# Altium footprint library Package_DFN_QFN.PcbLib: 735 footprints (part 6 of 46)
Each footprint in its own frame and in the unit in brackets; x right, y up, seen from the top. Pads: shape width x height; smd on the part's side, far side on the other; paste and mask are expansions set on the pad; w line width, h text height; cw(c..) or ccw(c..) is an arc to the next point about the centre after c.
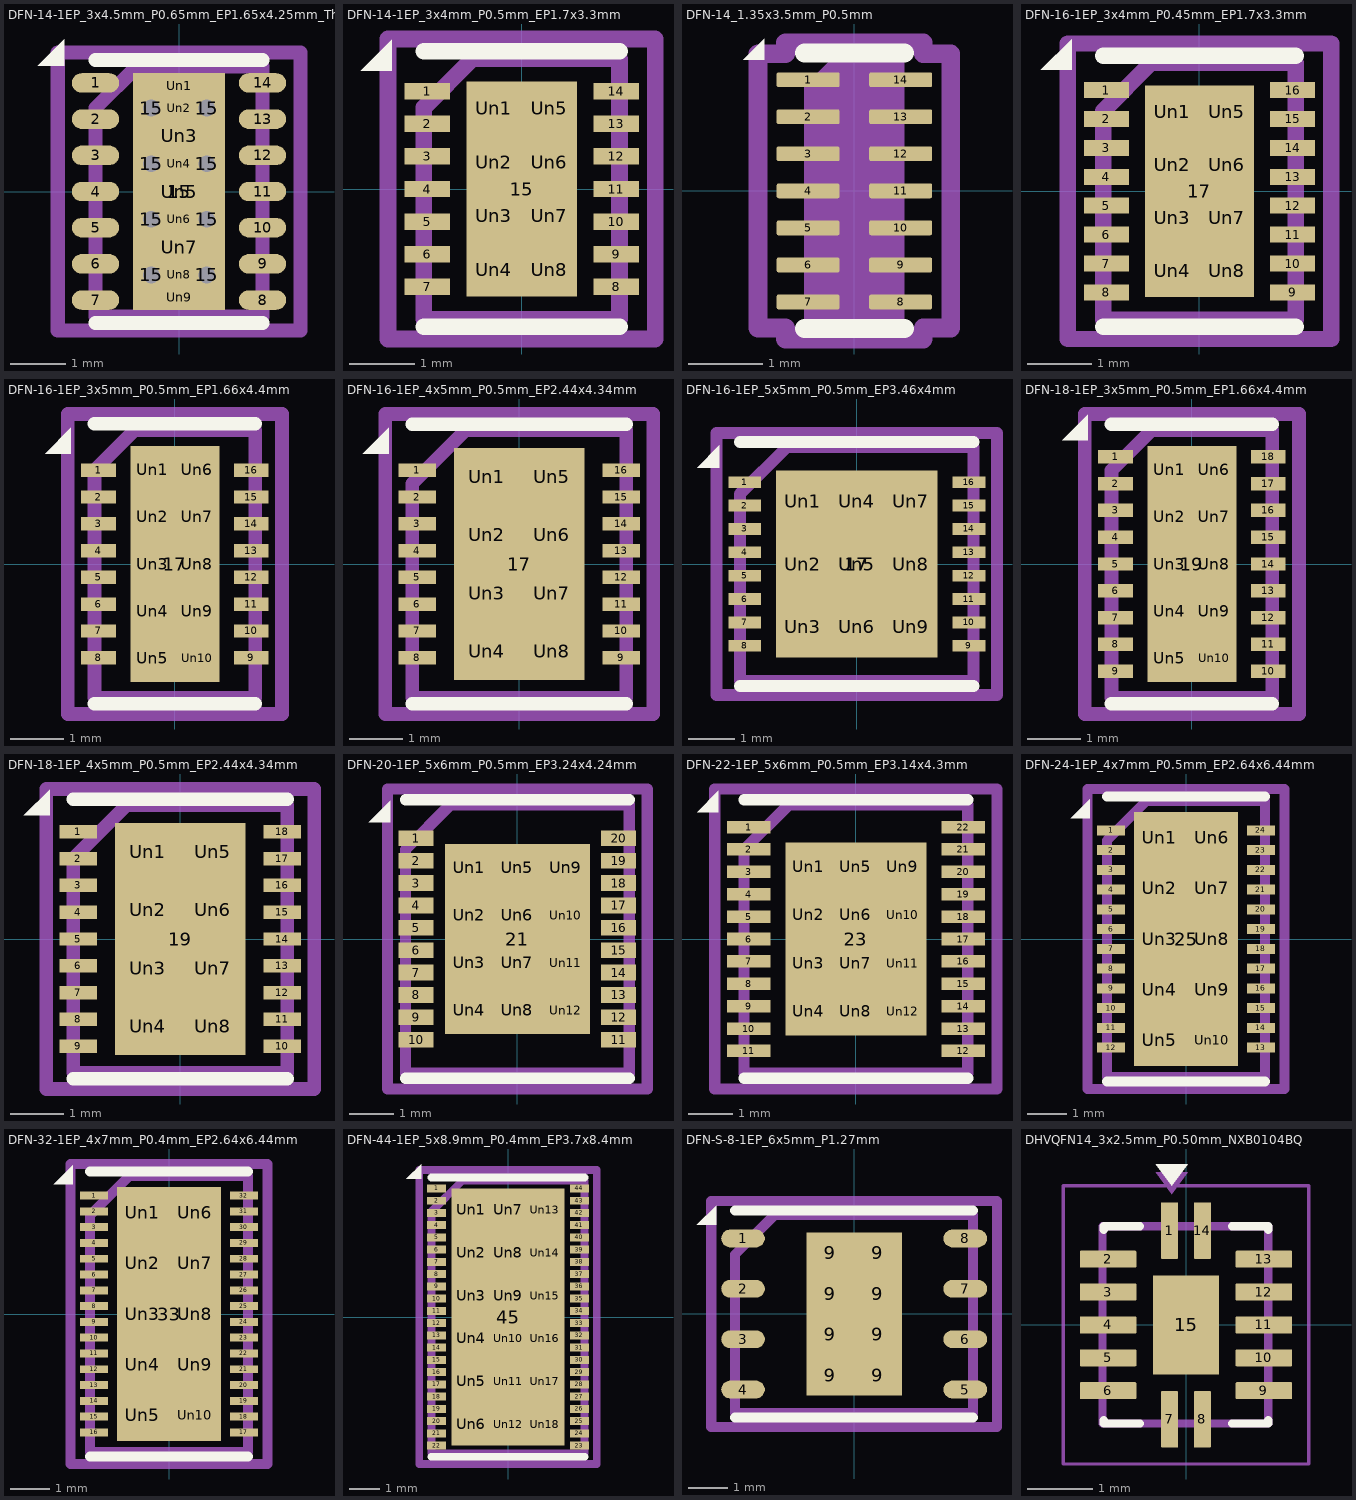
[diagram p5: the footprints below, top view; thin cyan lines are the x and y axes]

## DFN-14-1EP_3x4.5mm_P0.65mm_EP1.65x4.25mm_ThermalVias [mm] "DFN-14-1EP_3x4.5mm_P0.65mm_EP1.65x4.25mm_ThermalVias"
pads (33):
  rrect100% 0.85x0.35 smd: 1(-1.5,1.95) 2(-1.5,1.3) 3(-1.5,0.65) 4(-1.5,0) 5(-1.5,-0.65) 6(-1.5,-1.3) 7(-1.5,-1.95) 8(1.5,-1.95) 9(1.5,-1.3) 10(1.5,-0.65) 11(1.5,0) 12(1.5,0.65) 13(1.5,1.3) 14(1.5,1.95)
  round 0.65 hole 0.3: 15(-0.5,-1.5) 15(-0.5,-0.5) 15(-0.5,0.5) 15(-0.5,1.5) 15(0.5,-1.5) 15(0.5,-0.5) 15(0.5,0.5) 15(0.5,1.5)
  rect 1.65x4.25 smd: 15(0,0)
  rect 1.65x4.25 smd far side: 15(0,0)
  rect 1.5x0.3 on Top Paste: Un1(0,1.9) Un9(0,-1.9)
  rect 0.5x0.5 on Top Paste: Un2(0,1.5) Un4(0,0.5) Un6(0,-0.5) Un8(0,-1.5)
  rect 1.5x0.5 on Top Paste: Un3(0,1) Un5(0,0) Un7(0,-1)
F.SilkS:
  region: -2.06,2.26 -2.54,2.26 -2.06,2.74
  lines w0.254: -1.5,-2.36 1.5,-2.36 ; -1.5,2.36 1.5,2.36
Top Component Center:
  lines w0.127: -0.127,0 0.127,0 -0.127,0 ; 0,-0.127 0,0.127 0,-0.127
Top Assembly:
  lines w0.254: -1.5,-2.25 1.5,-2.25 1.5,2.25 -0.75,2.25 -1.5,1.5 -1.5,-2.25
Top Courtyard:
  lines w0.254: -2.18,-2.5 2.18,-2.5 2.18,2.5 -2.18,2.5 -2.18,-2.5
Top Designator:
  text ".Designator" at -3.43,-0.344 h1.52

## DFN-14-1EP_3x4mm_P0.5mm_EP1.7x3.3mm [mm] "DFN-14-1EP_3x4mm_P0.5mm_EP1.7x3.3mm"
pads (23):
  rect 0.7x0.25 smd: 1(-1.45,1.5) 2(-1.45,1) 3(-1.45,0.5) 4(-1.45,0) 5(-1.45,-0.5) 6(-1.45,-1) 7(-1.45,-1.5) 8(1.45,-1.5) 9(1.45,-1) 10(1.45,-0.5) 11(1.45,0) 12(1.45,0.5) 13(1.45,1) 14(1.45,1.5)
  rect 1.7x3.3 smd: 15(0,0)
  rect 0.685x0.67 on Top Paste: Un1(-0.425,1.238) Un2(-0.425,0.413) Un3(-0.425,-0.413) Un4(-0.425,-1.238) Un5(0.425,1.238) Un6(0.425,0.413) Un7(0.425,-0.413) Un8(0.425,-1.238)
F.SilkS:
  region: -1.99,1.81 -2.47,1.81 -1.99,2.29
  lines w0.254: -1.5,-2.11 1.5,-2.11 ; -1.5,2.11 1.5,2.11
Top Component Center:
  lines w0.127: -0.127,0 0.127,0 -0.127,0 ; 0,-0.127 0,0.127 0,-0.127
Top Assembly:
  lines w0.254: -1.5,-2 1.5,-2 1.5,2 -0.75,2 -1.5,1.25 -1.5,-2
Top Courtyard:
  lines w0.254: -2.05,-2.3 2.05,-2.3 2.05,2.3 -2.05,2.3 -2.05,-2.3
Top Designator:
  text ".Designator" at -3.43,-0.344 h1.52
3D body "DFN-14-1EP_3x4mm_P0.5mm_EP1.7x3.3mm.step": height 0.77, standoff 0, extent -1.5,-1.99 1.5,1.99

## DFN-14_1.35x3.5mm_P0.5mm [mm] "DFN-14_1.35x3.5mm_P0.5mm"
pads (14):
  rrect25% 0.85x0.2 smd: 1(-0.625,1.5) 2(-0.625,1) 3(-0.625,0.5) 4(-0.625,0) 5(-0.625,-0.5) 6(-0.625,-1) 7(-0.625,-1.5) 8(0.625,-1.5) 9(0.625,-1) 10(0.625,-0.5) 11(0.625,0) 12(0.625,0.5) 13(0.625,1) 14(0.625,1.5)
F.SilkS:
  region: -1.22,1.77 -1.5,1.77 -1.22,2.05
  lines w0.254: -0.675,-1.86 0.675,-1.86 ; -0.675,1.86 0.675,1.86
Top Component Center:
  lines w0.127: -0.127,0 0.127,0 -0.127,0 ; 0,-0.127 0,0.127 0,-0.127
Top Assembly:
  region: 0.675,-1.75 -0.675,-1.75 -0.675,1.412 -0.337,1.75 0.675,1.75
Top Courtyard:
  lines w0.254: -1.3,-1.85 -1.3,1.85 -0.93,1.85 -0.93,2 0.93,2 0.93,1.85 1.3,1.85 1.3,-1.85 0.93,-1.85 0.93,-2 -0.93,-2 -0.93,-1.85 -1.3,-1.85
Top Designator:
  text ".Designator" at -2.251,-0.226 h1

## DFN-16-1EP_3x4mm_P0.45mm_EP1.7x3.3mm [mm] "DFN-16-1EP_3x4mm_P0.45mm_EP1.7x3.3mm"
pads (25):
  rect 0.7x0.25 smd: 1(-1.45,1.575) 2(-1.45,1.125) 3(-1.45,0.675) 4(-1.45,0.225) 5(-1.45,-0.225) 6(-1.45,-0.675) 7(-1.45,-1.125) 8(-1.45,-1.575) 9(1.45,-1.575) 10(1.45,-1.125) 11(1.45,-0.675) 12(1.45,-0.225) 13(1.45,0.225) 14(1.45,0.675) 15(1.45,1.125) 16(1.45,1.575)
  rect 1.7x3.3 smd: 17(0,0)
  rect 0.685x0.67 on Top Paste: Un1(-0.425,1.238) Un2(-0.425,0.413) Un3(-0.425,-0.413) Un4(-0.425,-1.238) Un5(0.425,1.238) Un6(0.425,0.413) Un7(0.425,-0.413) Un8(0.425,-1.238)
F.SilkS:
  region: -1.99,1.89 -2.47,1.89 -1.99,2.37
  lines w0.254: -1.5,-2.11 1.5,-2.11 ; -1.5,2.11 1.5,2.11
Top Component Center:
  lines w0.127: -0.127,0 0.127,0 -0.127,0 ; 0,-0.127 0,0.127 0,-0.127
Top Assembly:
  lines w0.254: -1.5,-2 1.5,-2 1.5,2 -0.75,2 -1.5,1.25 -1.5,-2
Top Courtyard:
  lines w0.254: -2.05,-2.3 2.05,-2.3 2.05,2.3 -2.05,2.3 -2.05,-2.3
Top Designator:
  text ".Designator" at -3.43,-0.344 h1.52
3D body "DFN-16-1EP_3x4mm_P0.45mm_EP1.7x3.3mm.step": height 0.77, standoff 0, extent -1.5,-1.99 1.5,1.99

## DFN-16-1EP_3x5mm_P0.5mm_EP1.66x4.4mm [mm] "DFN-16-1EP_3x5mm_P0.5mm_EP1.66x4.4mm"
pads (27):
  rect 0.65x0.25 smd: 1(-1.425,1.75) 2(-1.425,1.25) 3(-1.425,0.75) 4(-1.425,0.25) 5(-1.425,-0.25) 6(-1.425,-0.75) 7(-1.425,-1.25) 8(-1.425,-1.75) 9(1.425,-1.75) 10(1.425,-1.25) 11(1.425,-0.75) 12(1.425,-0.25) 13(1.425,0.25) 14(1.425,0.75) 15(1.425,1.25) 16(1.425,1.75)
  rect 1.66x4.4 smd: 17(0,0)
  rect 0.67x0.71 on Top Paste: Un1(-0.415,1.76) Un2(-0.415,0.88) Un3(-0.415,0) Un4(-0.415,-0.88) Un5(-0.415,-1.76) Un6(0.415,1.76) Un7(0.415,0.88) Un8(0.415,0) Un9(0.415,-0.88) Un10(0.415,-1.76)
F.SilkS:
  region: -1.94,2.06 -2.42,2.06 -1.94,2.54
  lines w0.254: -1.5,-2.61 1.5,-2.61 ; -1.5,2.62 1.5,2.62
Top Component Center:
  lines w0.127: -0.127,0 0.127,0 -0.127,0 ; 0,-0.127 0,0.127 0,-0.127
Top Assembly:
  lines w0.254: -1.5,-2.5 1.5,-2.5 1.5,2.5 -0.75,2.5 -1.5,1.75 -1.5,-2.5
Top Courtyard:
  lines w0.254: -2,-2.8 2,-2.8 2,2.8 -2,2.8 -2,-2.8
Top Designator:
  text ".Designator" at -3.43,-0.344 h1.52
3D body "DFN-16-1EP_3x5mm_P0.5mm_EP1.66x4.4mm.step": height 0.77, standoff 0, extent -1.5,-2.49 1.5,2.49

## DFN-16-1EP_4x5mm_P0.5mm_EP2.44x4.34mm [mm] "DFN-16-1EP_4x5mm_P0.5mm_EP2.44x4.34mm"
pads (25):
  rect 0.7x0.25 smd: 1(-1.9,1.75) 2(-1.9,1.25) 3(-1.9,0.75) 4(-1.9,0.25) 5(-1.9,-0.25) 6(-1.9,-0.75) 7(-1.9,-1.25) 8(-1.9,-1.75) 9(1.9,-1.75) 10(1.9,-1.25) 11(1.9,-0.75) 12(1.9,-0.25) 13(1.9,0.25) 14(1.9,0.75) 15(1.9,1.25) 16(1.9,1.75)
  rect 2.44x4.34 smd: 17(0,0)
  rect 1x0.86 on Top Paste: Un1(-0.61,1.627) Un2(-0.61,0.543) Un3(-0.61,-0.543) Un4(-0.61,-1.627) Un5(0.61,1.627) Un6(0.61,0.543) Un7(0.61,-0.543) Un8(0.61,-1.627)
F.SilkS:
  region: -2.44,2.06 -2.92,2.06 -2.44,2.54
  lines w0.254: -2,-2.61 2,-2.61 ; -2,2.61 2,2.61
Top Component Center:
  lines w0.127: -0.127,0 0.127,0 -0.127,0 ; 0,-0.127 0,0.127 0,-0.127
Top Assembly:
  lines w0.254: -2,-2.5 -2,1.5 -1,2.5 2,2.5 2,-2.5 -2,-2.5
Top Courtyard:
  lines w0.254: -2.5,-2.8 -2.5,2.8 2.5,2.8 2.5,-2.8 -2.5,-2.8
Top Designator:
  text ".Designator" at -3.43,-0.344 h1.52

## DFN-16-1EP_5x5mm_P0.5mm_EP3.46x4mm [mm] "DFN-16-1EP_5x5mm_P0.5mm_EP3.46x4mm"
pads (26):
  rect 0.7x0.25 smd: 1(-2.4,1.75) 2(-2.4,1.25) 3(-2.4,0.75) 4(-2.4,0.25) 5(-2.4,-0.25) 6(-2.4,-0.75) 7(-2.4,-1.25) 8(-2.4,-1.75) 9(2.4,-1.75) 10(2.4,-1.25) 11(2.4,-0.75) 12(2.4,-0.25) 13(2.4,0.25) 14(2.4,0.75) 15(2.4,1.25) 16(2.4,1.75)
  rect 3.46x4 smd: 17(0,0)
  rect 0.9x1.1 on Top Paste: Un1(-1.154,1.34) Un2(-1.154,0) Un3(-1.154,-1.34) Un4(0,1.34) Un5(0,0) Un6(0,-1.34) Un7(1.154,1.34) Un8(1.154,0) Un9(1.154,-1.34)
F.SilkS:
  region: -2.94,2.06 -3.42,2.06 -2.94,2.54
  lines w0.254: -2.5,-2.61 2.5,-2.61 ; -2.5,2.61 2.5,2.61
Top Component Center:
  lines w0.127: -0.127,0 0.127,0 -0.127,0 ; 0,-0.127 0,0.127 0,-0.127
Top Assembly:
  lines w0.254: -2.5,-2.5 -2.5,1.5 -1.5,2.5 2.5,2.5 2.5,-2.5 -2.5,-2.5
Top Courtyard:
  lines w0.254: -3,-2.8 -3,2.8 3,2.8 3,-2.8 -3,-2.8
Top Designator:
  text ".Designator" at -3.43,-0.344 h1.52
3D body "DFN-16-1EP_5x5mm_P0.5mm_EP3.46x4mm.step": height 0.77, standoff 0, extent -2.5,-2.49 2.5,2.49

## DFN-18-1EP_3x5mm_P0.5mm_EP1.66x4.4mm [mm] "DFN-18-1EP_3x5mm_P0.5mm_EP1.66x4.4mm"
pads (29):
  rect 0.65x0.25 smd: 1(-1.425,2) 2(-1.425,1.5) 3(-1.425,1) 4(-1.425,0.5) 5(-1.425,0) 6(-1.425,-0.5) 7(-1.425,-1) 8(-1.425,-1.5) 9(-1.425,-2) 10(1.425,-2) 11(1.425,-1.5) 12(1.425,-1) 13(1.425,-0.5) 14(1.425,0) 15(1.425,0.5) 16(1.425,1) 17(1.425,1.5) 18(1.425,2)
  rect 1.66x4.4 smd: 19(0,0)
  rect 0.67x0.71 on Top Paste: Un1(-0.415,1.76) Un2(-0.415,0.88) Un3(-0.415,0) Un4(-0.415,-0.88) Un5(-0.415,-1.76) Un6(0.415,1.76) Un7(0.415,0.88) Un8(0.415,0) Un9(0.415,-0.88) Un10(0.415,-1.76)
F.SilkS:
  region: -1.94,2.31 -2.42,2.31 -1.94,2.79
  lines w0.254: -1.5,-2.61 1.5,-2.61 ; -1.5,2.61 1.5,2.61
Top Component Center:
  lines w0.127: -0.127,0 0.127,0 -0.127,0 ; 0,-0.127 0,0.127 0,-0.127
Top Assembly:
  lines w0.254: -1.5,-2.5 1.5,-2.5 1.5,2.5 -0.75,2.5 -1.5,1.75 -1.5,-2.5
Top Courtyard:
  lines w0.254: -2,-2.8 2,-2.8 2,2.8 -2,2.8 -2,-2.8
Top Designator:
  text ".Designator" at -3.43,-0.344 h1.52
3D body "DFN-18-1EP_3x5mm_P0.5mm_EP1.66x4.4mm.step": height 0.77, standoff 0, extent -1.5,-2.49 1.5,2.49

## DFN-18-1EP_4x5mm_P0.5mm_EP2.44x4.34mm [mm] "DFN-18-1EP_4x5mm_P0.5mm_EP2.44x4.34mm"
pads (27):
  rect 0.7x0.25 smd: 1(-1.9,2) 2(-1.9,1.5) 3(-1.9,1) 4(-1.9,0.5) 5(-1.9,0) 6(-1.9,-0.5) 7(-1.9,-1) 8(-1.9,-1.5) 9(-1.9,-2) 10(1.9,-2) 11(1.9,-1.5) 12(1.9,-1) 13(1.9,-0.5) 14(1.9,0) 15(1.9,0.5) 16(1.9,1) 17(1.9,1.5) 18(1.9,2)
  rect 2.44x4.34 smd: 19(0,0)
  rect 1x0.86 on Top Paste: Un1(-0.61,1.627) Un2(-0.61,0.543) Un3(-0.61,-0.543) Un4(-0.61,-1.627) Un5(0.61,1.627) Un6(0.61,0.543) Un7(0.61,-0.543) Un8(0.61,-1.627)
F.SilkS:
  region: -2.44,2.31 -2.92,2.31 -2.44,2.79
  lines w0.254: -2,-2.61 2,-2.61 ; -2,2.61 2,2.61
Top Component Center:
  lines w0.127: -0.127,0 0.127,0 -0.127,0 ; 0,-0.127 0,0.127 0,-0.127
Top Assembly:
  lines w0.254: -2,-2.5 2,-2.5 2,2.5 -1,2.5 -2,1.5 -2,-2.5
Top Courtyard:
  lines w0.254: -2.5,-2.8 2.5,-2.8 2.5,2.8 -2.5,2.8 -2.5,-2.8
Top Designator:
  text ".Designator" at -3.43,-0.344 h1.52
3D body "DFN-18-1EP_4x5mm_P0.5mm_EP2.44x4.34mm.step": height 0.77, standoff 0, extent -2,-2.49 2,2.49

## DFN-20-1EP_5x6mm_P0.5mm_EP3.24x4.24mm [mm] "DFN-20-1EP_5x6mm_P0.5mm_EP3.24x4.24mm"
pads (33):
  rect 0.78x0.35 smd: 1(-2.26,2.25) 2(-2.26,1.75) 3(-2.26,1.25) 4(-2.26,0.75) 5(-2.26,0.25) 6(-2.26,-0.25) 7(-2.26,-0.75) 8(-2.26,-1.25) 9(-2.26,-1.75) 10(-2.26,-2.25) 11(2.26,-2.25) 12(2.26,-1.75) 13(2.26,-1.25) 14(2.26,-0.75) 15(2.26,-0.25) 16(2.26,0.25) 17(2.26,0.75) 18(2.26,1.25) 19(2.26,1.75) 20(2.26,2.25)
  rect 3.24x4.24 smd: 21(0,0)
  rect 0.86x0.86 on Top Paste: Un1(-1.08,1.59) Un2(-1.08,0.53) Un3(-1.08,-0.53) Un4(-1.08,-1.59) Un5(0,1.59) Un6(0,0.53) Un7(0,-0.53) Un8(0,-1.59) Un9(1.08,1.59) Un10(1.08,0.53) Un11(1.08,-0.53) Un12(1.08,-1.59)
F.SilkS:
  region: -2.84,2.61 -3.32,2.61 -2.84,3.09
  lines w0.254: -2.5,-3.11 2.5,-3.11 ; -2.5,3.11 2.5,3.11
Top Component Center:
  lines w0.127: -0.127,0 0.127,0 -0.127,0 ; 0,-0.127 0,0.127 0,-0.127
Top Assembly:
  lines w0.254: -2.5,-3 2.5,-3 2.5,3 -1.5,3 -2.5,2 -2.5,-3
Top Courtyard:
  lines w0.254: -2.9,-3.35 2.9,-3.35 2.9,3.35 -2.9,3.35 -2.9,-3.35
Top Designator:
  text ".Designator" at -3.43,-0.344 h1.52
3D body "DFN-20-1EP_5x6mm_P0.5mm_EP3.24x4.24mm.step": height 0.92, standoff 0, extent -2.5,-2.99 2.5,2.99

## DFN-22-1EP_5x6mm_P0.5mm_EP3.14x4.3mm [mm] "DFN-22-1EP_5x6mm_P0.5mm_EP3.14x4.3mm"
pads (35):
  rect 0.98x0.28 smd: 1(-2.395,2.5) 2(-2.395,2) 3(-2.395,1.5) 4(-2.395,1) 5(-2.395,0.5) 6(-2.395,0) 7(-2.395,-0.5) 8(-2.395,-1) 9(-2.395,-1.5) 10(-2.395,-2) 11(-2.395,-2.5) 12(2.395,-2.5) 13(2.395,-2) 14(2.395,-1.5) 15(2.395,-1) 16(2.395,-0.5) 17(2.395,0) 18(2.395,0.5) 19(2.395,1) 20(2.395,1.5) 21(2.395,2) 22(2.395,2.5)
  rect 3.14x4.3 smd: 23(0,0)
  rect 0.855x0.855 on Top Paste: Un1(-1.05,1.613) Un2(-1.05,0.537) Un3(-1.05,-0.537) Un4(-1.05,-1.613) Un5(0,1.613) Un6(0,0.537) Un7(0,-0.537) Un8(0,-1.613) Un9(1.05,1.613) Un10(1.05,0.537) Un11(1.05,-0.537) Un12(1.05,-1.613)
F.SilkS:
  region: -3.07,2.83 -3.55,2.83 -3.07,3.31
  lines w0.254: -2.5,-3.11 2.5,-3.11 ; -2.5,3.11 2.5,3.11
Top Component Center:
  lines w0.127: -0.127,0 0.127,0 -0.127,0 ; 0,-0.127 0,0.127 0,-0.127
Top Assembly:
  lines w0.254: -2.5,-3 2.5,-3 2.5,3 -1.5,3 -2.5,2 -2.5,-3
Top Courtyard:
  lines w0.254: -3.15,-3.35 3.15,-3.35 3.15,3.35 -3.15,3.35 -3.15,-3.35
Top Designator:
  text ".Designator" at -3.43,-0.344 h1.52
3D body "DFN-22-1EP_5x6mm_P0.5mm_EP3.14x4.3mm.step": height 0.92, standoff 0, extent -2.5,-2.99 2.5,2.99

## DFN-24-1EP_4x7mm_P0.5mm_EP2.64x6.44mm [mm] "DFN-24-1EP_4x7mm_P0.5mm_EP2.64x6.44mm"
pads (35):
  rect 0.7x0.25 smd: 1(-1.9,2.75) 2(-1.9,2.25) 3(-1.9,1.75) 4(-1.9,1.25) 5(-1.9,0.75) 6(-1.9,0.25) 7(-1.9,-0.25) 8(-1.9,-0.75) 9(-1.9,-1.25) 10(-1.9,-1.75) 11(-1.9,-2.25) 12(-1.9,-2.75) 13(1.9,-2.75) 14(1.9,-2.25) 15(1.9,-1.75) 16(1.9,-1.25) 17(1.9,-0.75) 18(1.9,-0.25) 19(1.9,0.25) 20(1.9,0.75) 21(1.9,1.25) 22(1.9,1.75) 23(1.9,2.25) 24(1.9,2.75)
  rect 2.64x6.44 smd: 25(0,0)
  rect 1.05x1.05 on Top Paste: Un1(-0.66,2.56) Un2(-0.66,1.28) Un3(-0.66,0) Un4(-0.66,-1.28) Un5(-0.66,-2.56) Un6(0.66,2.56) Un7(0.66,1.28) Un8(0.66,0) Un9(0.66,-1.28) Un10(0.66,-2.56)
F.SilkS:
  region: -2.44,3.06 -2.92,3.06 -2.44,3.54
  lines w0.254: -2,-3.61 2,-3.61 ; -2,3.61 2,3.61
Top Component Center:
  lines w0.127: -0.127,0 0.127,0 -0.127,0 ; 0,-0.127 0,0.127 0,-0.127
Top Assembly:
  lines w0.254: -2,-3.5 -2,2.5 -1,3.5 2,3.5 2,-3.5 -2,-3.5
Top Courtyard:
  lines w0.254: -2.5,-3.8 -2.5,3.8 2.5,3.8 2.5,-3.8 -2.5,-3.8
Top Designator:
  text ".Designator" at -3.43,-0.344 h1.52
3D body "DFN-24-1EP_4x7mm_P0.5mm_EP2.64x6.44mm.step": height 0.77, standoff 0, extent -2,-3.49 2,3.49

## DFN-32-1EP_4x7mm_P0.4mm_EP2.64x6.44mm [mm] "DFN-32-1EP_4x7mm_P0.4mm_EP2.64x6.44mm"
pads (43):
  rect 0.7x0.2 smd: 1(-1.9,3) 2(-1.9,2.6) 3(-1.9,2.2) 4(-1.9,1.8) 5(-1.9,1.4) 6(-1.9,1) 7(-1.9,0.6) 8(-1.9,0.2) 9(-1.9,-0.2) 10(-1.9,-0.6) 11(-1.9,-1) 12(-1.9,-1.4) 13(-1.9,-1.8) 14(-1.9,-2.2) 15(-1.9,-2.6) 16(-1.9,-3) 17(1.9,-3) 18(1.9,-2.6) 19(1.9,-2.2) 20(1.9,-1.8) 21(1.9,-1.4) 22(1.9,-1) 23(1.9,-0.6) 24(1.9,-0.2) 25(1.9,0.2) 26(1.9,0.6) 27(1.9,1) 28(1.9,1.4) 29(1.9,1.8) 30(1.9,2.2) 31(1.9,2.6) 32(1.9,3)
  rect 2.64x6.44 smd: 33(0,0)
  rect 1.05x1.05 on Top Paste: Un1(-0.66,2.56) Un2(-0.66,1.28) Un3(-0.66,0) Un4(-0.66,-1.28) Un5(-0.66,-2.56) Un6(0.66,2.56) Un7(0.66,1.28) Un8(0.66,0) Un9(0.66,-1.28) Un10(0.66,-2.56)
F.SilkS:
  region: -2.44,3.29 -2.92,3.29 -2.44,3.77
  lines w0.254: -2,-3.61 2,-3.61 ; -2,3.61 2,3.61
Top Component Center:
  lines w0.127: -0.127,0 0.127,0 -0.127,0 ; 0,-0.127 0,0.127 0,-0.127
Top Assembly:
  lines w0.254: -2,-3.5 2,-3.5 2,3.5 -1,3.5 -2,2.5 -2,-3.5
Top Courtyard:
  lines w0.254: -2.5,-3.8 2.5,-3.8 2.5,3.8 -2.5,3.8 -2.5,-3.8
Top Designator:
  text ".Designator" at -3.43,-0.344 h1.52
3D body "DFN-32-1EP_4x7mm_P0.4mm_EP2.64x6.44mm.step": height 0.77, standoff 0, extent -2,-3.49 2,3.49

## DFN-44-1EP_5x8.9mm_P0.4mm_EP3.7x8.4mm [mm] "DFN-44-1EP_5x8.9mm_P0.4mm_EP3.7x8.4mm"
pads (63):
  rect 0.63x0.26 smd: 1(-2.335,4.2) 2(-2.335,3.8) 3(-2.335,3.4) 4(-2.335,3) 5(-2.335,2.6) 6(-2.335,2.2) 7(-2.335,1.8) 8(-2.335,1.4) 9(-2.335,1) 10(-2.335,0.6) 11(-2.335,0.2) 12(-2.335,-0.2) 13(-2.335,-0.6) 14(-2.335,-1) 15(-2.335,-1.4) 16(-2.335,-1.8) 17(-2.335,-2.2) 18(-2.335,-2.6) 19(-2.335,-3) 20(-2.335,-3.4) 21(-2.335,-3.8) 22(-2.335,-4.2) 23(2.335,-4.2) 24(2.335,-3.8) 25(2.335,-3.4) 26(2.335,-3) 27(2.335,-2.6) 28(2.335,-2.2) 29(2.335,-1.8) 30(2.335,-1.4) 31(2.335,-1) 32(2.335,-0.6) 33(2.335,-0.2) 34(2.335,0.2) 35(2.335,0.6) 36(2.335,1) 37(2.335,1.4) 38(2.335,1.8) 39(2.335,2.2) 40(2.335,2.6) 41(2.335,3) 42(2.335,3.4) 43(2.335,3.8) 44(2.335,4.2)
  rect 3.7x8.4 smd: 45(0,0)
  rect 0.98x1.15 on Top Paste: Un1(-1.2,3.5) Un2(-1.2,2.1) Un3(-1.2,0.7) Un4(-1.2,-0.7) Un5(-1.2,-2.1) Un6(-1.2,-3.5) Un7(0,3.5) Un8(0,2.1) Un9(0,0.7) Un10(0,-0.7) Un11(0,-2.1) Un12(0,-3.5) Un13(1.2,3.5) Un14(1.2,2.1) Un15(1.2,0.7) Un16(1.2,-0.7) Un17(1.2,-2.1) Un18(1.2,-3.5)
F.SilkS:
  region: -2.84,4.52 -3.32,4.52 -2.84,5
  lines w0.254: -2.5,-4.56 2.5,-4.56 ; -2.5,4.56 2.5,4.56
Top Component Center:
  lines w0.127: -0.127,0 0.127,0 -0.127,0 ; 0,-0.127 0,0.127 0,-0.127
Top Assembly:
  lines w0.254: -2.5,-4.45 2.5,-4.45 2.5,4.45 -1.5,4.45 -2.5,3.45 -2.5,-4.45
Top Courtyard:
  lines w0.254: -2.9,-4.8 2.9,-4.8 2.9,4.8 -2.9,4.8 -2.9,-4.8
Top Designator:
  text ".Designator" at -3.43,-0.344 h1.52
3D body "DFN-44-1EP_5x8.9mm_P0.4mm_EP3.7x8.4mm.step": height 0.87, standoff 0, extent -2.5,-4.44 2.5,4.44

## DFN-S-8-1EP_6x5mm_P1.27mm [mm] "DFN-S-8-1EP_6x5mm_P1.27mm"
pads (16):
  rrect100% 1.1x0.45 smd: 1(-2.8,1.905) 2(-2.8,0.635) 3(-2.8,-0.635) 4(-2.8,-1.905) 5(2.8,-1.905) 6(2.8,-0.635) 7(2.8,0.635) 8(2.8,1.905)
  rect 1.2x1.025 smd: 9(-0.6,-1.538) 9(-0.6,-0.512) 9(-0.6,0.513) 9(-0.6,1.538) 9(0.6,-1.538) 9(0.6,-0.512) 9(0.6,0.513) 9(0.6,1.538)
F.SilkS:
  region: -3.48,2.25 -3.96,2.25 -3.48,2.73
  lines w0.254: -3,-2.61 3,-2.61 ; -3,2.61 3,2.61
Top Component Center:
  lines w0.127: -0.127,0 0.127,0 -0.127,0 ; 0,-0.127 0,0.127 0,-0.127
Top Assembly:
  lines w0.254: -3,-2.5 -3,1.5 -2,2.5 3,2.5 3,-2.5 -3,-2.5
Top Courtyard:
  lines w0.254: -3.6,-2.85 -3.6,2.85 3.6,2.85 3.6,-2.85 -3.6,-2.85
Top Designator:
  text ".Designator" at -3.43,-0.344 h1.52
3D body "DFN-S-8-1EP_6x5mm_P1.27mm.step": height 0.92, standoff 0, extent -3,-2.49 3,2.49

## DHVQFN14_3x2.5mm_P0.50mm_NXB0104BQ [mm]
pads (15):
  rrect12% 0.26x0.86 smd: 1(-0.25,1.435) 7(-0.25,-1.435) 8(0.25,-1.435) 14(0.25,1.435)
  rrect12% 0.86x0.26 smd: 2(-1.185,1) 3(-1.185,0.5) 4(-1.185,0) 5(-1.185,-0.5) 6(-1.185,-1) 9(1.185,-1) 10(1.185,-0.5) 11(1.185,0) 12(1.185,0.5) 13(1.185,1)
  rect 1x1.5 smd: 15(0,0)
F.SilkS:
  region: -0.217,2.118 -0.457,2.448 0.023,2.448
  lines w0.127: -1.25,-1.45 -1.25,-1.5 -0.7,-1.5 ; -1.25,1.45 -1.25,1.5 -0.7,1.5 ; 0.7,-1.5 1.25,-1.5 1.25,-1.45 ; 0.7,1.5 1.25,1.5 1.25,1.45
F.Paste:
  region: 0.32,-0.47 -0.32,-0.47 -0.32,0.47 0.32,0.47
Top Assembly:
  region: -0.217,1.991 -0.457,2.321 0.023,2.321
  lines w0.127: -1.27,-1.5 1.25,-1.5 1.25,1.5 -1.27,1.5 -1.27,-1.5
Top Courtyard:
  lines w0.05: -1.865,-2.115 1.865,-2.115 1.865,2.115 -1.865,2.115 -1.865,-2.115
3D body "DHVQFN-14-1EP_2.5x3mm_P0.5mm_EP1x1.5mm.step": height 1, standoff 0, extent -1.25,-1.5 1.25,1.5